# Altium schematic symbol library J_HEADER_2x8.SchLib: 1 symbol
Pins are listed as number, name and electrical type; pins without a type are passive.

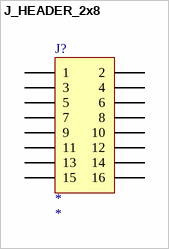
[diagram p0: symbol J_HEADER_2x8]

## J_HEADER_2x8
designator J?
Pin Header; SCH_Footprint: *; Value: *
pins: 1, 2, 3, 4, 5, 6, 7, 8, 9, 10, 11, 12, 13, 14, 15, 16